# Altium footprint library RES_SMD.PcbLib: 5 footprints
Each footprint in its own frame and in the unit in brackets; x right, y up, seen from the top. Pads: shape width x height; smd on the part's side, far side on the other; paste and mask are expansions set on the pad; w line width, h text height; cw(c..) or ccw(c..) is an arc to the next point about the centre after c.
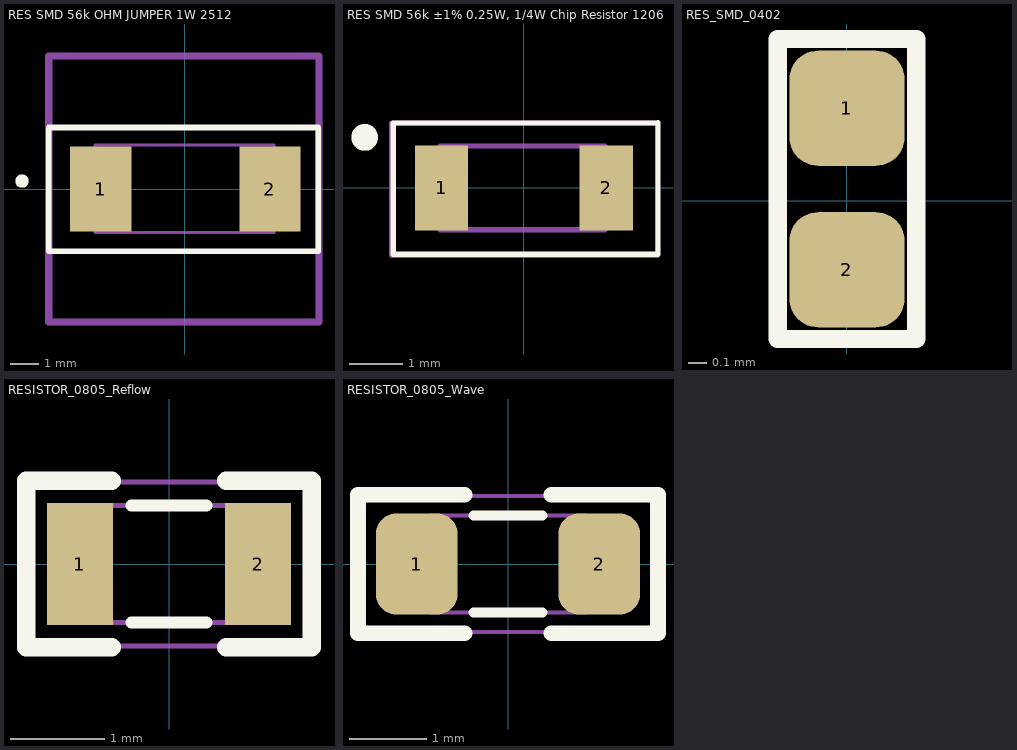
[diagram p0: the footprints below, top view; thin cyan lines are the x and y axes]

## RES SMD 56k OHM JUMPER 1W 2512 [mm] "RES SMD 56k OHM JUMPER 1W 2512"
pads (2):
  rect 2.15x3 smd: 1(-2.95,0) 2(3,0)
Top Overlay:
  circle w0.254: c-5.715,0.279 r0.108
  lines w0.2: -4.775,-2.184 -4.775,2.159 4.699,2.159 4.699,-2.184 -4.775,-2.184
Top Assembly:
  lines w0.1: -3.15,-1.524 3.15,-1.524 3.15,1.549 -3.15,1.549 -3.15,-1.524
The flat projection:
  lines w0.254: -4.775,-4.674 4.724,-4.674 4.724,4.674 -4.775,4.674 -4.775,-4.674
  text "+" at -0.076,-0.116 h0.38
Mechanical 29:
  text ".Designator" at -3.531,-0.424 h1.52
3D body "CR2512-J_-000ELF.STEP": height 0.75, standoff 0, extent -3.125,-1.575 3.175,1.525

## RES SMD 56k ±1% 0.25W, 1/4W Chip Resistor 1206 [mm] "RES SMD 56 kO ±1% 0.25W, 1/4W Chip Resistor 1206 (3216 Metric) Moisture Resistant Thick Film"
pads (2):
  rect 1x1.6 smd: 1(-1.55,0) 2(1.55,0)
Top Overlay:
  circle w0.254: c-3,0.95 r0.125
  lines w0.1: 2.489,1.219 -2.464,1.219 -2.464,-1.25 2.525,-1.25 2.525,1.225
Top Assembly:
  lines w0.1: -1.575,-0.787 1.524,-0.787 1.524,0.787 -1.575,0.787 -1.575,-0.787
The flat projection:
  lines w0.1: -2.489,-1.27 -2.489,1.219 2.515,1.219 2.515,-1.27 -2.489,-1.27
  text "+" at -0.076,-0.116 h0.38
Mechanical 29:
  text ".Designator" at -3.353,-0.424 h1.52
3D body "RC1206FR-071KL.STEP": height 0.65, standoff 0, extent -1.6,-0.775 1.5,0.825

## RES_SMD_0402 [mil]
pads (2):
  rrect50% 25x25 smd: 1(0,20) 2(0,-15)
Top Overlay:
  lines w3.94: -15,-30 -15,35 15,35 15,-30 -3,-30 -15,-30
3D body "step_temp.STEP": height 15.75, standoff 0, extent -9.84,-14.69 9.84,24.68

## RESISTOR_0805_Reflow [mm]
pads (2):
  rect 0.7x1.3 smd: 1(-0.95,0) 2(0.95,0)
Top Overlay:
  lines w0.127: -0.4,-0.625 0.4,-0.625 ; -0.4,0.625 0.4,0.625
  lines w0.2: -0.61,-0.889 -1.524,-0.889 -1.524,0.889 -0.61,0.889 ; 0.61,-0.889 1.524,-0.889 1.524,0.889 0.61,0.889
The flat projection:
  lines w0.05: -1,-0.625 -1,0.625 1,0.625 1,-0.625 -1,-0.625
Mechanical 29:
  lines w0.05: -1.5,-0.875 -1.5,0.875 1.5,0.875 1.5,-0.875 -1.5,-0.875
3D body "CRCW0805.step": height 0.46, standoff 0.01, extent -1,-0.625 1,0.625

## RESISTOR_0805_Wave [mm]
pads (2):
  rrect50% 1.05x1.3 smd: 1(-1.175,0) 2(1.175,0)
Top Overlay:
  lines w0.127: -0.445,-0.625 0.445,-0.625 ; -0.445,0.625 0.445,0.625
  lines w0.2: -0.559,-0.889 -1.93,-0.889 -1.93,0.889 -0.559,0.889 ; 0.559,-0.889 1.93,-0.889 1.93,0.889 0.559,0.889
The flat projection:
  lines w0.05: -1,-0.625 1,-0.625 1,0.625 -1,0.625 -1,-0.625
Mechanical 29:
  lines w0.05: -1.9,-0.875 1.9,-0.875 1.9,0.875 -1.9,0.875 -1.9,-0.875
  text "'.Designator'" at -0.508,-0.141 h0.6
3D body "CRCW0805.step": height 0.46, standoff 0.01, extent -1,-0.625 1,0.625